# Altium footprint library 1.20-电感.PcbLib: 71 footprints (part 4 of 5)
Each footprint in its own frame and in the unit in brackets; x right, y up, seen from the top. Pads: shape width x height; smd on the part's side, far side on the other; paste and mask are expansions set on the pad; w line width, h text height; cw(c..) or ccw(c..) is an arc to the next point about the centre after c.
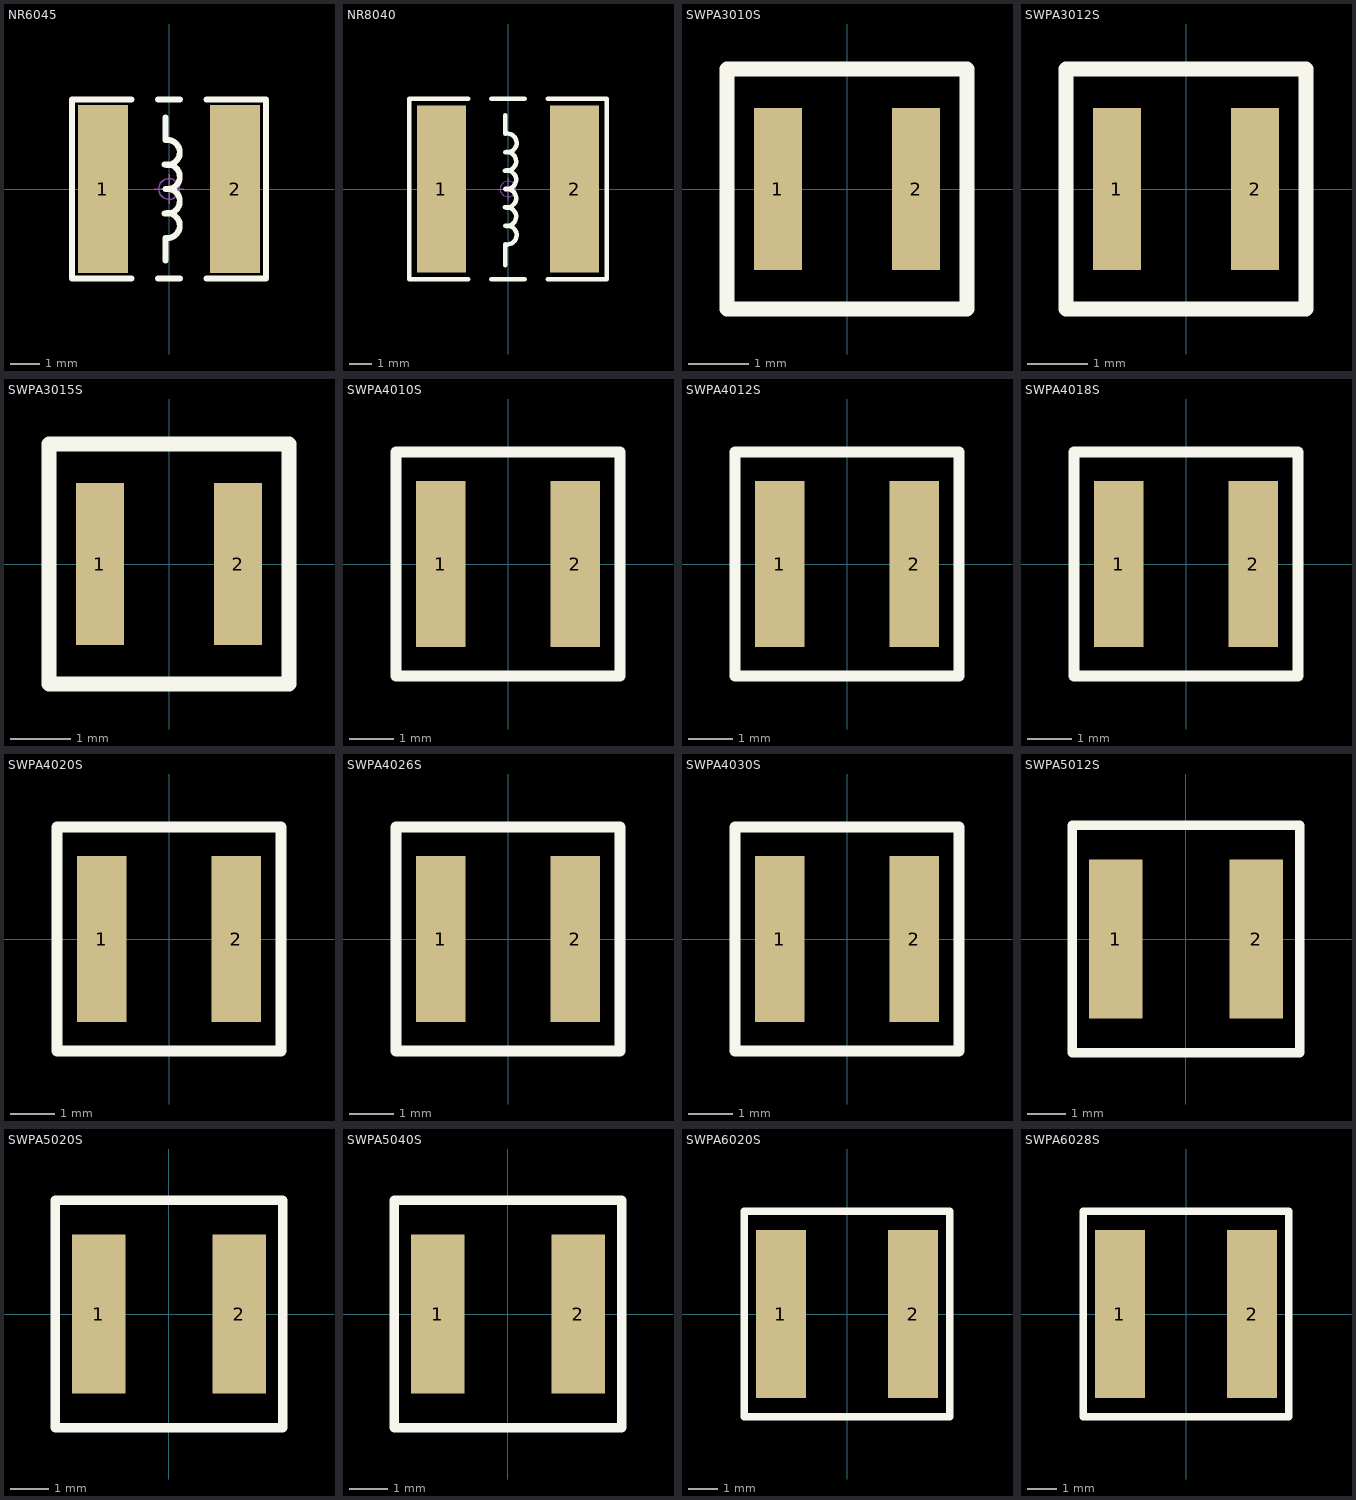
[diagram p3: the footprints below, top view; thin cyan lines are the x and y axes]

## NR6045 [mm] "6.0mm*6.0mm*4.5mm(长*宽*高）"
pads (2):
  rect 1.7x5.7 smd: 1(-2.25,0) 2(2.25,0)
Top Overlay:
  lines w0.203: -1.27,-3.048 -3.302,-3.048 -3.302,3.048 -1.27,3.048 ; -0.381,-3.048 0.381,-3.048 ; -0.381,3.048 0.381,3.048 ; -0.127,-2.424 -0.127,-1.662 ccw(c-0.057,-1.244) -0.149,-0.831 ccw(c-0.057,-0.418) -0.127,0 ccw(c-0.057,0.418) -0.149,0.831 ccw(c-0.057,1.244) -0.127,1.662 -0.127,2.424 ; 1.27,-3.048 3.302,-3.048 3.302,3.048 1.27,3.048
Mechanical 15:
  circle w0.05: c0,0 r0.35
  lines w0.05: -0.5,0 0.5,0 ; 0,-0.5 0,0.5
3D body "NR6045.STEP": height 4.6, standoff 0, extent -3,-3 3,3

## NR8040 [mm] "8.0mm*8.0mm*4.0mm(长*宽*高）"
pads (2):
  rect 2.2x7.5 smd: 1(-3,0) 2(3,0)
Top Overlay:
  lines w0.203: -1.778,-4.064 -4.445,-4.064 -4.445,4.064 -1.778,4.064 ; -0.762,-4.064 0.762,-4.064 ; -0.762,4.064 0.762,4.064 ; -0.127,-3.44 -0.127,-2.492 ; -0.127,2.492 -0.127,3.313 ; -0.105,-2.492 ccw(c-0.035,-2.075) -0.127,-1.662 ccw(c-0.057,-1.244) -0.149,-0.831 ccw(c-0.057,-0.418) -0.127,0 ccw(c-0.057,0.418) -0.149,0.831 ccw(c-0.057,1.244) -0.127,1.662 ccw(c-0.035,2.075) -0.105,2.492 ; 1.778,-4.064 4.445,-4.064 4.445,4.064 1.778,4.064
Mechanical 15:
  circle w0.05: c0,0 r0.35
  lines w0.05: -0.5,0 0.5,0 ; 0,-0.5 0,0.5
3D body "NR8040.STEP": height 4.1, standoff 0, extent -4,-4 4,4

## SWPA3010S [mm] "轮廓3mm*3mm ，焊盘间距1.5mm        淘宝ID:黄晶宝石"
height 1
pads (2):
  rect 0.8x2.7 smd: 1(-1.15,0) 2(1.15,0)
Top Overlay:
  lines w0.254: -2,-2 -2,2 0,2 2,2 2,-2 -2,-2
3D body "3010.STEP": height 1, standoff -0.02, extent -1.5,-1.5 1.5,1.5

## SWPA3012S [mm] "轮廓3mm*3mm ，焊盘间距1.5mm        淘宝ID:黄晶宝石"
height 1.2
pads (2):
  rect 0.8x2.7 smd: 1(-1.15,0) 2(1.15,0)
Top Overlay:
  lines w0.254: -2,-2 2,-2 2,2 0,2 -2,2 -2,-2
3D body "3012.STEP": height 1.2, standoff -0.02, extent -1.5,-1.5 1.5,1.5

## SWPA3015S [mm] "轮廓3mm*3mm ，焊盘间距1.5mm        淘宝ID:黄晶宝石"
height 1.5
pads (2):
  rect 0.8x2.7 smd: 1(-1.15,0) 2(1.15,0)
Top Overlay:
  lines w0.254: -2,-2 2,-2 2,2 0,2 -2,2 -2,-2
3D body "3015.STEP": height 1.5, standoff -0.02, extent -1.5,-1.5 1.5,1.5

## SWPA4010S [mm] "轮廓4mm*4mm ，焊盘间距1.9mm        淘宝ID:黄晶宝石"
height 1
pads (2):
  rect 1.1x3.7 smd: 1(-1.5,0) 2(1.5,0)
Top Overlay:
  lines w0.254: -2.5,-2.5 2.5,-2.5 2.5,2.5 -2.5,2.5 -2.5,-2.5
3D body "4010.STEP": height 1, standoff -0.02, extent -2,-2 2,2

## SWPA4012S [mm] "轮廓4mm*4mm ，焊盘间距1.9mm        淘宝ID:黄晶宝石"
height 1.2
pads (2):
  rect 1.1x3.7 smd: 1(-1.5,0) 2(1.5,0)
Top Overlay:
  lines w0.254: -2.5,-2.5 -2.5,2.5 2.5,2.5 2.5,-2.5 -2.5,-2.5
3D body "4012.STEP": height 1.2, standoff -0.02, extent -2,-2 2,2

## SWPA4018S [mm] "轮廓4mm*4mm ，焊盘间距1.9mm        淘宝ID:黄晶宝石"
height 1.8
pads (2):
  rect 1.1x3.7 smd: 1(-1.5,0) 2(1.5,0)
Top Overlay:
  lines w0.254: -2.5,-2.5 2.5,-2.5 2.5,2.5 -2.5,2.5 -2.5,-2.5
3D body "4018.STEP": height 1.8, standoff -0.02, extent -2,-2 2,2

## SWPA4020S [mm] "轮廓4mm*4mm ，焊盘间距1.9mm        淘宝ID:黄晶宝石"
height 2
pads (2):
  rect 1.1x3.7 smd: 1(-1.5,0) 2(1.5,0)
Top Overlay:
  lines w0.254: -2.5,-2.5 -2.5,2.5 2.5,2.5 2.5,-2.5 -2.5,-2.5
3D body "4020.STEP": height 2, standoff -0.02, extent -2,-2 2,2

## SWPA4026S [mm] "轮廓4mm*4mm ，焊盘间距1.9mm        淘宝ID:黄晶宝石"
height 2.6
pads (2):
  rect 1.1x3.7 smd: 1(-1.5,0) 2(1.5,0)
Top Overlay:
  lines w0.254: -2.5,-2.5 -2.5,2.5 2.5,2.5 2.5,-2.5 -2.5,-2.5
3D body "4026.STEP": height 2.6, standoff -0.02, extent -2,-2 2,2

## SWPA4030S [mm] "轮廓4mm*4mm ，焊盘间距1.9mm        淘宝ID:黄晶宝石"
height 3
pads (2):
  rect 1.1x3.7 smd: 1(-1.5,0) 2(1.5,0)
Top Overlay:
  lines w0.254: -2.5,-2.5 2.5,-2.5 2.5,2.5 -2.5,2.5 -2.5,-2.5
3D body "4030.STEP": height 3, standoff -0.02, extent -2,-2 2,2

## SWPA5012S [mm] "轮廓5mm*5mm ，焊盘间距2.3mm        淘宝ID:黄晶宝石"
height 1.2
pads (2):
  rect 1.4x4.2 smd: 1(-1.85,0) 2(1.85,0)
Top Overlay:
  lines w0.254: -3,-3 -3,3 3,3 3,-3 -3,-3
3D body "5012S.STEP": height 1.2, standoff -0.02, extent -2.5,-2.5 2.5,2.5

## SWPA5020S [mm] "轮廓5mm*5mm ，焊盘间距2.3mm        淘宝ID:黄晶宝石"
height 2
pads (2):
  rect 1.4x4.2 smd: 1(-1.85,0) 2(1.85,0)
Top Overlay:
  lines w0.254: -3,-3 3,-3 3,3 -3,3 -3,-3
3D body "5020S.STEP": height 2, standoff -0.02, extent -2.5,-2.5 2.5,2.5

## SWPA5040S [mm] "轮廓5mm*5mm ，焊盘间距2.3mm        淘宝ID:黄晶宝石"
height 4
pads (2):
  rect 1.4x4.2 smd: 1(-1.85,0) 2(1.85,0)
Top Overlay:
  lines w0.254: -3,-3 3,-3 3,3 -3,3 -3,-3
3D body "5040S.SLDPRT": height 4, standoff -0.02, extent -2.5,-2.5 2.5,2.5

## SWPA6020S [mm] "轮廓6mm*6mm ，焊盘间距2.8mm        淘宝ID:黄晶宝石"
height 2
pads (2):
  rect 1.7x5.7 smd: 1(-2.25,0) 2(2.25,0)
Top Overlay:
  lines w0.254: -3.5,-3.5 -3.5,3.5 0,3.5 3.5,3.5 3.5,-3.5 -3.5,-3.5
3D body "6020S.STEP": height 2, standoff -0.02, extent -3,-3 3,3

## SWPA6028S [mm] "轮廓6mm*6mm ，焊盘间距2.8mm        淘宝ID:黄晶宝石"
height 2.8
pads (2):
  rect 1.7x5.7 smd: 1(-2.25,0) 2(2.25,0)
Top Overlay:
  lines w0.254: -3.5,-3.5 3.5,-3.5 3.5,3.5 0,3.5 -3.5,3.5 -3.5,-3.5
3D body "6028S.STEP": height 2.5, standoff -0.02, extent -3,-3 3,3